# Altium footprint library PA.PcbLib: 3 footprints
Each footprint in its own frame and in the unit in brackets; x right, y up, seen from the top. Pads: shape width x height; smd on the part's side, far side on the other; paste and mask are expansions set on the pad; w line width, h text height; cw(c..) or ccw(c..) is an arc to the next point about the centre after c.
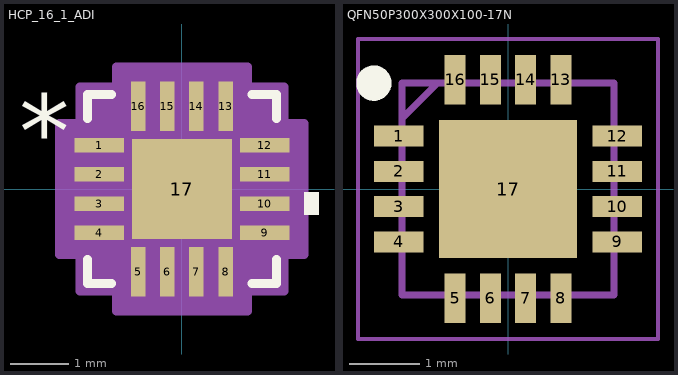
[diagram p0: the footprints below, top view; thin cyan lines are the x and y axes]

## HCP_16_1_ADI [mm]
pads (17):
  rect 0.85x0.25 smd paste+0 mask+0: 1(-1.425,0.75) 2(-1.425,0.25) 3(-1.425,-0.25) 4(-1.425,-0.75) 9(1.425,-0.75) 10(1.425,-0.25) 11(1.425,0.25) 12(1.425,0.75)
  rect 0.25x0.85 smd paste+0 mask+0: 5(-0.75,-1.425) 6(-0.25,-1.425) 7(0.25,-1.425) 8(0.75,-1.425) 13(0.75,1.425) 14(0.25,1.425) 15(-0.25,1.425) 16(-0.75,1.425)
  rect 1.725x1.725 smd paste+0 mask+0: 17(0,0)
Top Overlay:
  region: 2.104,-0.059 2.358,-0.059 2.358,-0.44 2.104,-0.44
  lines w0.152: -1.627,-1.208 -1.627,-1.627 -1.208,-1.627 ; -1.627,1.208 -1.627,1.627 -1.208,1.627 ; 1.208,-1.627 1.627,-1.627 1.627,-1.208 ; 1.208,1.627 1.627,1.627 1.627,1.208
  text ".Designator" at -3.492,-0.635 h1.27
  text "*" at -2.802,0.365 h1.27
Mechanical 13:
  lines w0.025: -1.5,0.23 -0.23,1.5 ; -1.55,-0.9 -1.5,-0.9 -1.5,-0.6 -1.55,-0.6 -1.55,-0.9 ; -1.55,-0.4 -1.5,-0.4 -1.5,-0.1 -1.55,-0.1 -1.55,-0.4 ; -1.55,0.1 -1.5,0.1 -1.5,0.4 -1.55,0.4 -1.55,0.1 ; -1.55,0.6 -1.5,0.6 -1.5,0.9 -1.55,0.9 -1.55,0.6 ; -1.5,-1.5 -1.5,1.5 1.5,1.5 1.5,-1.5 -1.5,-1.5 ; -0.9,-1.55 -0.6,-1.55 -0.6,-1.5 -0.9,-1.5 -0.9,-1.55 ; -0.9,1.5 -0.9,1.55 -0.6,1.55 -0.6,1.5 -0.9,1.5 ; -0.4,-1.55 -0.1,-1.55 -0.1,-1.5 -0.4,-1.5 -0.4,-1.55 ; -0.4,1.5 -0.4,1.55 -0.1,1.55 -0.1,1.5 -0.4,1.5 ; 0.1,-1.55 0.4,-1.55 0.4,-1.5 0.1,-1.5 0.1,-1.55 ; 0.1,1.5 0.1,1.55 0.4,1.55 0.4,1.5 0.1,1.5 ; 0.6,-1.55 0.9,-1.55 0.9,-1.5 0.6,-1.5 0.6,-1.55 ; 0.6,1.5 0.6,1.55 0.9,1.55 0.9,1.5 0.6,1.5 ; 1.5,-0.9 1.55,-0.9 1.55,-0.6 1.5,-0.6 1.5,-0.9 ; 1.5,-0.4 1.55,-0.4 1.55,-0.1 1.5,-0.1 1.5,-0.4 ; 1.5,0.1 1.55,0.1 1.55,0.4 1.5,0.4 1.5,0.1 ; 1.5,0.6 1.55,0.6 1.55,0.9 1.5,0.9 1.5,0.6
  text "*" at -1.318,0.365 h1.27
  text ".Designator" at -3.492,-0.635 h1.27
Mechanical 15:
  region: -1.129,-1.754 -1.754,-1.754 -1.754,-1.129 -2.104,-1.129 -2.104,1.129 -1.754,1.129 -1.754,1.754 -1.129,1.754 -1.129,2.104 1.129,2.104 1.129,1.754 1.754,1.754 1.754,1.129 2.104,1.129 2.104,-1.129 1.754,-1.129 1.754,-1.754 1.129,-1.754 1.129,-2.104 -1.129,-2.104
  lines w0.152: -2.104,-1.129 -2.104,1.129 -1.754,1.129 -1.754,1.754 -1.129,1.754 -1.129,2.104 1.129,2.104 1.129,1.754 1.754,1.754 1.754,1.129 2.104,1.129 2.104,-1.129 1.754,-1.129 1.754,-1.754 1.129,-1.754 1.129,-2.104 -1.129,-2.104 -1.129,-1.754 -1.754,-1.754 -1.754,-1.129 -2.104,-1.129
3D body "HCP_16_1_ADI.step": height 1, standoff 0, extent -1.55,-1.55 1.55,1.55

## PCBComponent_1 [mm]

## QFN50P300X300X100-17N [mm]
pads (17):
  rect 0.7x0.3 smd: 1(-1.55,0.75) 2(-1.55,0.25) 3(-1.55,-0.25) 4(-1.55,-0.75) 9(1.55,-0.75) 10(1.55,-0.25) 11(1.55,0.25) 12(1.55,0.75)
  rect 0.3x0.7 smd: 5(-0.75,-1.55) 6(-0.25,-1.55) 7(0.25,-1.55) 8(0.75,-1.55) 13(0.75,1.55) 14(0.25,1.55) 15(-0.25,1.55) 16(-0.75,1.55)
  rect 1.95x1.95 smd: 17(0,0)
Top Overlay:
  circle w0.25: c-1.9,1.5 r0.125
Mechanical 13:
  lines w0.1: -1.5,1 -1,1.5 ; -1.5,-1.5 -1.5,1.5 1.5,1.5 1.5,-1.5 -1.5,-1.5
Mechanical 15:
  lines w0.05: -2.125,-2.125 -2.125,2.125 2.125,2.125 2.125,-2.125 -2.125,-2.125
3D body "HMC408LP3E.stp": height 1, standoff 0, extent -1.55,-1.55 1.55,1.55